# Altium integrated library VIETTIEN.IntLib: 173 symbols (part 4 of 8)

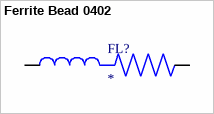
[diagram p69: symbol Ferrite Bead 0402]

## Ferrite Bead 0402
designator FL?
Ferrite Bead 0402; MF: Murata; MP: NFZ15SG151SN11D; SnapEDA_Link: https://www.snapeda.com/parts/NFZ15SG151SN11D/Murata/view-part/?ref=snap; Package: 1005 Taiyo Yuden; Value: *; Check_prices: https://www.snapeda.com/parts/NFZ15SG151SN11D/Murata/view-part/?ref=eda
footprint BEADC1005X55N
pins: 1, 2


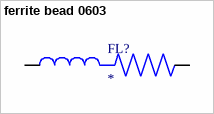
[diagram p70: symbol ferrite bead 0603]

## ferrite bead 0603
designator FL?
ferrite bead 0603; MP: BLM18BD421SZ1D; Package: None; Price: None; Value: *; Availability: Unavailable
footprint BEADC1608X95N
pins: 1, 2


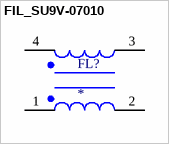
[diagram p71: symbol FIL_SU9V-07010]

## FIL_SU9V-07010
designator FL?
1 mH @ 1 kHz 2 Line Common Mode Choke Through Hole 700mA DCR 600mOhm; MF: Kemet; MP: SU9V-07010; SnapEDA_Link: https://www.snapeda.com/parts/SU9V-07010/Kemet/view-part/?ref=snap; Package: Vertical-4 Kemet; Value: *; Check_prices: https://www.snapeda.com/parts/SU9V-07010/Kemet/view-part/?ref=eda
footprint FIL_SU9V-07010
pins: 1, 2, 3, 4


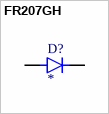
[diagram p72: symbol FR207GH]

## FR207GH
designator D?
500ns, 2A, 1000V, Fast Recovery Rectifier; MF: Taiwan Semiconductor Corporation; MP: FR207GH; SnapEDA_Link: https://www.snapeda.com/parts/FR207GH/Taiwan+Semiconductor/view-part/?ref=snap; Package: DO-15 Taiwan Semiconductor; Value: *; Check_prices: https://www.snapeda.com/parts/FR207GH/Taiwan+Semiconductor/view-part/?ref=eda
footprint DIOAD1300W80L670D310
pins: A, C K


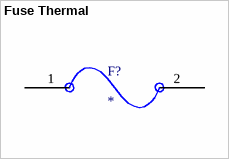
[diagram p73: symbol Fuse Thermal]

## Fuse Thermal
designator F?
Fuse, Resettable, Fast Acting, 10A, Sz 1206, 0.134x0.071x0.033", SMT, 24VDC, PCB | Bourns MF-NSMF200-2
footprint Fuse_thermal
pins: 1, 2


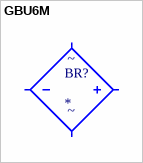
[diagram p74: symbol GBU6M]

## GBU6M
designator BR?
Bridge Rectifier Single Phase Standard 1 kV Through Hole GBU; MF: ON Semiconductor; MP: GBU6M; SnapEDA_Link: https://www.snapeda.com/parts/GBU6M/Onsemi/view-part/?ref=snap; Package: SIP-4 ON Semiconductor; Value: *; Check_prices: https://www.snapeda.com/parts/GBU6M/Onsemi/view-part/?ref=eda
footprint GBU_4L
pins: 1 (io), 2 (io), 3 (io), 4 (io)
text: ~


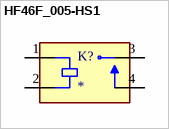
[diagram p75: symbol HF46F_005-HS1]

## HF46F_005-HS1
designator K?
Relay: electromagnetic; SPST-NO; Ucoil: 5VDC; 5A/250VAC; 5A/30VDC; MF: Hongfa; MP: HF46F/005-HS1; SnapEDA_Link: https://www.snapeda.com/parts/HF46F/005-HS1/Hongfa/view-part/?ref=snap; Package: None; Value: *; Check_prices: https://www.snapeda.com/parts/HF46F/005-HS1/Hongfa/view-part/?ref=eda
footprint RELAY_HF46F_005-HS1
pins: 1 COIL1, 2 COIL2, 3 COM, 4 NO


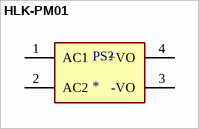
[diagram p76: symbol HLK-PM01]

## HLK-PM01
designator PS?
The HLK-PM01 is a small size low cost AC to DC converter which can take in 110V/220V AC at 50/60 Hz and give 5V 3W output. The module is can be used in designs which run on 5V and needs to be powered form the AC mains.; MF: Hi-link; SnapEDA_Link: https://www.snapeda.com/parts/hlk-pm01/Hi-link/view-part/?ref=snap; Package: None; Value: *; MP: hlk-pm01; Check_prices: https://www.snapeda.com/parts/hlk-pm01/Hi-link/view-part/?ref=eda
footprint CONV_HLK-PM01
pins: 1 AC1, 2 AC2, 3 -VO, 4 +VO


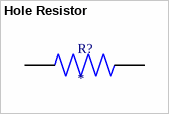
[diagram p77: symbol Hole Resistor]

## Hole Resistor
designator R?
X kOhms Â±1% 0.25W, 1/4W Through Hole Resistor Axial - Metal Film; MF: Yageo; MP: MFR-25FBF52-10K; SnapEDA_Link: https://www.snapeda.com/parts/MFR-25FBF52-10K/Yageo/view-part/?ref=snap; Package: RADIAL-2 YAGEO; Value: *; Check_prices: https://www.snapeda.com/parts/MFR-25FBF52-10K/Yageo/view-part/?ref=eda
footprint RESAD1100W55L680D260
pins: 1, 2


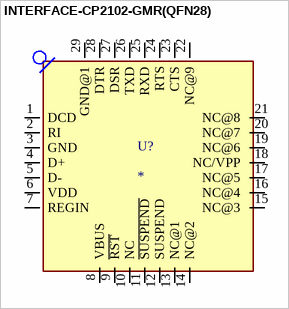
[diagram p78: symbol INTERFACE-CP2102-GMR(QFN28)]

## INTERFACE-CP2102-GMR(QFN28)
designator U?
USB Bridge, USB to UART USB 2.0 UART Interface 28-QFN (5x5); MP: CP2102-GMR; MF: Silicon; Price: None; Availability: In Stock; Package: VFQFN-28 Vishay Siliconix; SnapEDA_Link: https://www.snapeda.com/parts/CP2102-GMR/Silicon+Labs/view-part/?ref=snap; Check_prices: https://www.snapeda.com/parts/CP2102-GMR/Silicon+Labs/view-part/?ref=eda; Value: *; Purchase-URL: https://pricing.snapeda.com/search/part/CP2102-GMR/?ref=eda
footprint QFN28G_0.5-5X5MM
pins: 1 DCD (io), 2 RI (io), 3 GND (io), 4 D+ (io), 5 D- (io), 6 VDD (io), 7 REGIN (io), 8 VBUS (io), 9 ~{RST} (io), 10 NC (io), 11 ~{SUSPEND} (io), 12 SUSPEND (io), 13 NC@1 (io), 14 NC@2 (io), 15 NC@3 (io), 16 NC@4 (io), 17 NC@5 (io), 18 NC/VPP (io), 19 NC@6 (io), 20 NC@7 (io), 21 NC@8 (io), 22 NC@9 (io), 23 CTS (io), 24 RTS (io), 25 RXD (io), 26 TXD (io), 27 DSR (io), 28 DTR (io), 29 GND@1 (io)


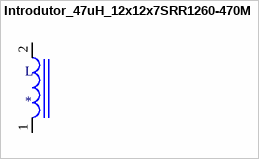
[diagram p79: symbol Introdutor_47uH_12x12x7SRR1260-470M]

## Introdutor_47uH_12x12x7SRR1260-470M
designator L
47ÂµH Shielded Wirewound Inductor 2.6A 86mOhm Max Nonstandard; MP: SRR1260-470M; MF: Bourns; Value: *; Package: Nonstandard Bourns; Price: None; SnapEDA_Link: https://www.snapeda.com/parts/SRR1260-470M/Bourns/view-part/283129/?ref=snap; Availability: Unavailable
footprint Introdutor_47uH_12x12x7
pins: 1, 2


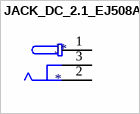
[diagram p80: symbol JACK_DC_2.1_EJ508A]

## JACK_DC_2.1_EJ508A
designator J*
Power Barrel Connector Jack 2.10mm ID _0.083_, 5.50mm OD _0.217_ Through Hole, Right Angle / EJ508A; MF: MPD; Package: Non-Standard MPD; Value: *; SnapEDA_Link: https://www.snapeda.com/parts/EJ508A/MPD%20%28Memory%20Protection%20Devices%29/view-part/474399/?ref=snap; Price: None; MP: EJ508A; Availability: Unavailable
footprint MPD_EJ508A
pins: 1, 2, 3


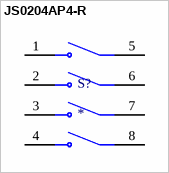
[diagram p81: symbol JS0204AP4-R]

## JS0204AP4-R
designator S?
Công Tắc DIP Switch Dán SMD 4 Bit 2.54mm; MP: JS0204AP4-R; Package: None; Price: None; Value: *; Availability: Unavailable
footprint SW_JS0204AP4-R
pins: 1, 2, 3, 4, 5, 6, 7, 8


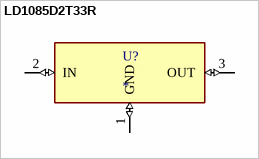
[diagram p82: symbol LD1085D2T33R]

## LD1085D2T33R
designator U?
Linear Voltage Regulator IC Positive Fixed 1 Output 3A D2PAK; MF: STMicroelectronics; MP: LD1085D2T33R; SnapEDA_Link: https://www.snapeda.com/parts/LD1085D2T33R/STMicroelectronics/view-part/?ref=snap; Package: TO-263-3 STMicroelectronics; Value: *; Check_prices: https://www.snapeda.com/parts/LD1085D2T33R/STMicroelectronics/view-part/?ref=eda
footprint LD1085D2T33R
pins: 1 GND (io), 2 IN (io), 3 OUT (io)


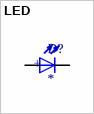
[diagram p83: symbol LED]

## LED
designator D?
WL-TMRC_5MM; MF: {'manufacturer': u'Wurth Electronics'}; MP: 151051RS11000; Package: None; Price: None; Value: *; Availability: Unavailable
footprint WL-TMRC_5MM
pins: 1 POS, 2 NEG
text: +


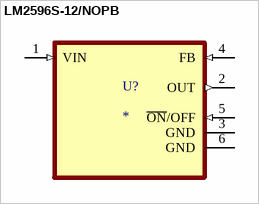
[diagram p84: symbol LM2596S-12/NOPB]

## LM2596S-12/NOPB
designator U?
SIMPLE SWITCHERÂ® 4.5V to 40V, 3A Low Component Count Step-Down Regulator; MF: Texas Instruments; MP: LM2596S-12/NOPB; SnapEDA_Link: https://www.snapeda.com/parts/LM2596S-12/NOPB/Texas+Instruments/view-part/?ref=snap; Package: TO-263-5 Texas Instruments; Value: *; Check_prices: https://www.snapeda.com/parts/LM2596S-12/NOPB/Texas+Instruments/view-part/?ref=eda
footprint VREG_LM2596S-12/NOPB
pins: 1 VIN (in), 2 OUT (out), 3 GND (power), 4 FB (in), 5 ~{ON}/OFF (in), 6 GND (power)


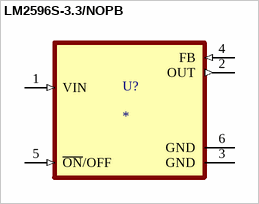
[diagram p85: symbol LM2596S-3.3/NOPB]

## LM2596S-3.3/NOPB
designator U?
SIMPLE SWITCHERÂ® 4.5V to 40V, 3A Low Component Count Step-Down Regulator 5-DDPAK/TO-263; MF: Texas Instruments; MP: LM2596S-3.3; SnapEDA_Link: https://www.snapeda.com/parts/LM2596S-3.3/Texas+Instruments/view-part/?ref=snap; Package: TO-263-5 Texas Instruments; Value: *; Check_prices: https://www.snapeda.com/parts/LM2596S-3.3/Texas+Instruments/view-part/?ref=eda
footprint VREG_LM2596S-3.3/NOPB
pins: 1 VIN (in), 2 OUT (out), 3 GND (power), 4 FB (in), 5 ~{ON}/OFF (in), 6 GND (power)


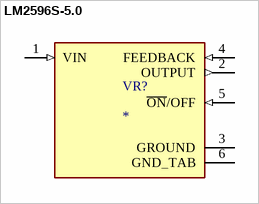
[diagram p86: symbol LM2596S-5.0]

## LM2596S-5.0
designator VR?
SIMPLE SWITCHERÂ® 4.5V to 40V, 3A Low Component Count Step-Down Regulator; MF: Texas Instruments; MP: LM2596S-5.0/NOPB; SnapEDA_Link: https://www.snapeda.com/parts/LM2596S-5.0/NOPB/Texas+Instruments/view-part/?ref=snap; Package: TO-263-5 Texas Instruments; Value: *; Check_prices: https://www.snapeda.com/parts/LM2596S-5.0/NOPB/Texas+Instruments/view-part/?ref=eda
footprint LM2596S-5.0
pins: 1 VIN (in), 2 OUTPUT (out), 3 GROUND (power), 4 FEEDBACK (in), 5 ~{ON}/OFF (in), 6 GND_TAB (power)


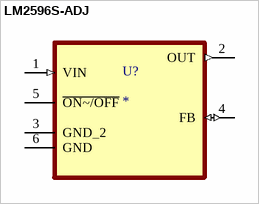
[diagram p87: symbol LM2596S-ADJ]

## LM2596S-ADJ
designator U?
Buck Switching Regulator IC Positive Adjustable 1.2V 1 Output 3A TO-263-6, DÂ²Pak (5 Leads + Tab), TO-263BA; MF: UMW; MP: LM2596S-ADJ; SnapEDA_Link: https://www.snapeda.com/parts/LM2596S-ADJ/Umwelt+Sensor+Teknik/view-part/?ref=snap; Package: None; Value: *; Check_prices: https://www.snapeda.com/parts/LM2596S-ADJ/Umwelt+Sensor+Teknik/view-part/?ref=eda
footprint LM2596S-ADJ
pins: 1 VIN (in), 2 OUT (out), 3 GND_2, 4 FB (io), 5 ~{ON~/OFF}, 6 GND


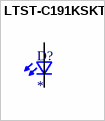
[diagram p88: symbol LTST-C191KSKT]

## LTST-C191KSKT
designator D?
Yellow 591nm LED Indication - Discrete 2.1V 0603 (1608 Metric); MF: Lite-On Inc.; MP: LTST-C191KSKT; SnapEDA_Link: https://www.snapeda.com/parts/LTST-C191KSKT/Lite-On/view-part/?ref=snap; Package: 0603 Lite-On Inc.; Value: *; Check_prices: https://www.snapeda.com/parts/LTST-C191KSKT/Lite-On/view-part/?ref=eda
footprint 0603
pins: 1 K2, 2 A2


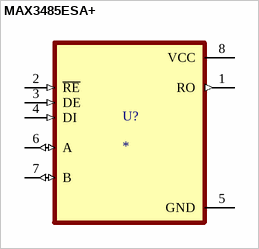
[diagram p89: symbol MAX3485ESA+]

## MAX3485ESA+
designator U?
3.3V Powered, 10Mbps and Slew-Rate Limited, True RS-485/RS-422 Transceivers; MF: Analog Devices; MP: MAX3485ESA+; SnapEDA_Link: https://www.snapeda.com/parts/MAX3485ESA+/Analog+Devices/view-part/?ref=snap; Package: SOIC-8 Maxim; Value: *; Check_prices: https://www.snapeda.com/parts/MAX3485ESA+/Analog+Devices/view-part/?ref=eda
footprint SOIC127P600X175-8N
pins: 1 RO (out), 2 ~{RE} (in), 3 DE (in), 4 DI (in), 5 GND (power), 6 A (io), 7 B (io), 8 VCC (power)


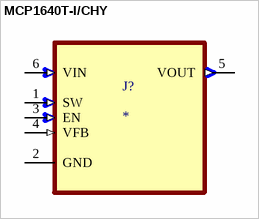
[diagram p90: symbol MCP1640T-I/CHY]

## MCP1640T-I/CHY
designator J?
Boost Switching Regulator IC Positive Adjustable 2V 1 Output 350mA SOT-23-6; MP: MCP1640T-I/CHY; MF: Microchip; SnapEDA_Link: https://www.snapeda.com/parts/MCP1640T-I/CHY/Microchip/view-part/?ref=snap; Availability: In Stock; Package: SOT-23-6 Microchip; Price: None; Check_prices: https://www.snapeda.com/parts/MCP1640T-I/CHY/Microchip/view-part/?ref=eda; Value: *; Purchase-URL: https://pricing.snapeda.com/search/part/MCP1640T-I/CHY/?ref=eda
footprint SOT95P270X145-6N
pins: 1 SW (in), 2 GND, 3 EN (in), 4 VFB (in), 5 VOUT (out), 6 VIN (in)


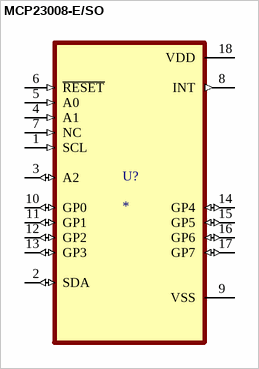
[diagram p91: symbol MCP23008-E/SO]

## MCP23008-E/SO
designator U?
8-BIT INPUT/OUTPUT EXPANDER, I2C INTERFACE | Microchip Technology Inc. MCP23008-E/SO; SnapEDA_Link: https://www.snapeda.com/parts/MCP23008-E/SO/Microchip+Technology/view-part/?ref=snap; Package: SOIC-18 Microchip; Value: *; MF: Microchip; MP: MCP23008-E/SO; Check_prices: https://www.snapeda.com/parts/MCP23008-E/SO/Microchip+Technology/view-part/?ref=eda
footprint SOIC127P1030X265-18N
pins: 1 SCL (in), 2 SDA (io), 3 A2 (io), 4 A1 (in), 5 A0 (in), 6 ~{RESET} (in), 7 NC (in), 8 INT (out), 9 VSS (power), 10 GP0 (io), 11 GP1 (io), 12 GP2 (io), 13 GP3 (io), 14 GP4 (io), 15 GP5 (io), 16 GP6 (io), 17 GP7 (io), 18 VDD (power)
